# Altium footprint library 3.11-micro USB 、3.1 Type C接口.PcbLib: 31 footprints (part 1 of 2)
Each footprint in its own frame and in the unit in brackets; x right, y up, seen from the top. Pads: shape width x height; smd on the part's side, far side on the other; paste and mask are expansions set on the pad; w line width, h text height; cw(c..) or ccw(c..) is an arc to the next point about the centre after c.
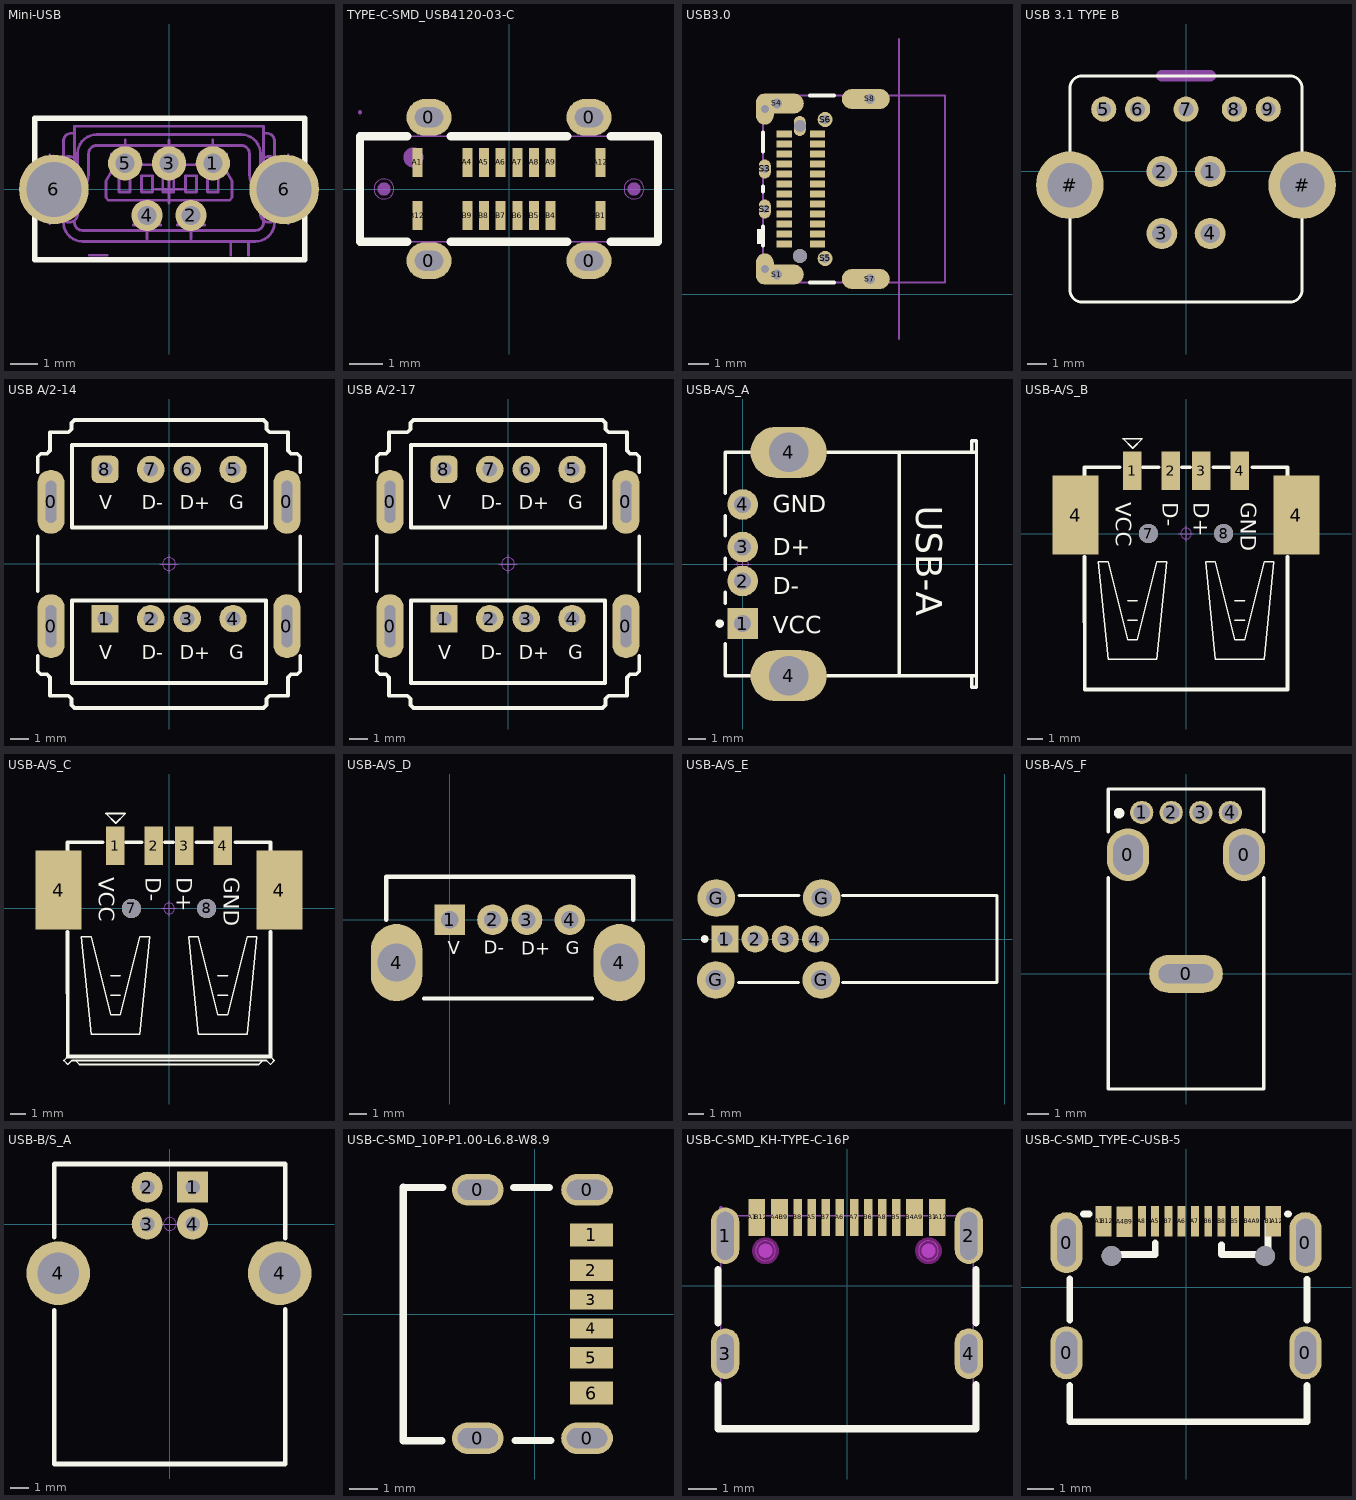
[diagram p0: the footprints below, top view; thin cyan lines are the x and y axes]

## Mini-USB [mm] "Straight, USB Serie Mini-B Type 2 Through Hole Receptacle"
height 7.7
pads (7):
  round 1.25 hole 0.7: 1(1.6,0.95) 3(0,0.95) 5(-1.6,0.95)
  round 1.143 hole 0.7: 2(0.8,-0.95) 4(-0.8,-0.95)
  round 2.54 hole 2.007: 6(-4.2,0) 6(4.2,0)
Top Overlay:
  lines w0.2: 1.4,0.5 1.8,0.5 ; -4.902,-2.565 4.953,-2.565 4.953,2.591 -3.031,2.591 -4.902,2.591 -4.902,-2.565
Mechanical 8:
  lines w0.1: -4.35,-1.25 -4.35,1.25 ; -4.15,0 -3.65,0 ; -3.65,-0.5 -3.65,0 ; -3.65,0.5 -3.65,0 ; -3.15,0 -3.65,0 ; -2.1,1.3 -1.6,1.3 ; -1.6,0.8 -1.6,1.3 ; -1.6,1.8 -1.6,1.3 ; -1.3,-1.3 -0.8,-1.3 ; -1.1,1.3 -1.6,1.3 ; -0.8,-1.8 -0.8,-1.3 ; -0.8,-0.8 -0.8,-1.3 ; -0.5,0 0,0 ; -0.5,1.3 0,1.3 ; -0.3,-1.3 -0.8,-1.3 ; 0,-0.5 0,0 ; 0,0.5 0,0 ; 0,0.8 0,1.3 ; 0,1.8 0,1.3 ; 0.3,-1.3 0.8,-1.3 ; 0.5,0 0,0 ; 0.5,1.3 0,1.3 ; 0.8,-1.8 0.8,-1.3 ; 0.8,-0.8 0.8,-1.3 ; 1.1,1.3 1.6,1.3 ; 1.3,-1.3 0.8,-1.3 ; 1.6,0.8 1.6,1.3 ; 1.6,1.8 1.6,1.3 ; 2.1,1.3 1.6,1.3 ; 3.15,0 3.65,0 ; 3.65,-0.5 3.65,0 ; 3.65,0.5 3.65,0 ; 4.15,0 3.65,0 ; 4.35,-1.25 4.35,1.25 ; -3.975,-0.875 ccw(c-3.65,-0.875) -3.325,-0.875 -3.325,0.875 ccw(c-3.65,0.875) -3.975,0.875 -3.975,-0.875 ; 3.325,-0.875 ccw(c3.65,-0.875) 3.975,-0.875 3.975,0.875 ccw(c3.65,0.875) 3.325,0.875 3.325,-0.875
Mechanical 14:
  lines w0.1: -3.45,-1.2 ccw(c-3.15,-1.2) -3.15,-1.5 3.15,-1.5 ccw(c3.15,-1.2) 3.45,-1.2 3.45,-0.403 ccw(c3.15,-0.403) 3.363,-0.192 3.138,0.035 cw(c3.635,0.528) 2.935,0.528 2.935,1.3 ccw(c2.635,1.3) 2.635,1.6 -2.635,1.6 ccw(c-2.635,1.3) -2.935,1.3 -2.935,0.528 cw(c-3.635,0.528) -3.138,0.035 -3.363,-0.192 ccw(c-3.15,-0.403) -3.45,-0.403 ; -3.45,0.288 -3.45,2.3 3.45,2.3 3.45,0.288 ; -3.45,2.05 -3.55,2.05 ccw(c-3.55,1.75) -3.85,1.75 -3.85,-0.403 ; -2.9,-2.4 -2.25,-2.4 ; 2.25,-2.4 2.25,-1.9 ; 2.9,-2.4 2.9,-1.9 ; 3.45,2.05 3.55,2.05 cw(c3.55,1.75) 3.85,1.75 3.85,-0.403 ; -3.85,-0.403 cw(c-3.15,-0.403) -3.647,0.089 -3.422,0.317 ccw(c-3.635,0.528) -3.335,0.528 -3.335,1.3 cw(c-2.635,1.3) -2.635,2 2.635,2 cw(c2.635,1.3) 3.335,1.3 3.335,0.528 ccw(c3.635,0.528) 3.422,0.317 3.647,0.089 cw(c3.15,-0.403) 3.85,-0.403 ; -3.85,-0.403 -3.85,-1.2 ccw(c-3.15,-1.2) -3.15,-1.9 3.15,-1.9 ccw(c3.15,-1.2) 3.85,-1.2 3.85,-0.403 ; 2.2,-0.4 2.3,-0.3 ; 2.2,-0.4 -2.2,-0.4 -2.3,-0.3 -2.3,0.3 -1.838,1.1 -1.318,1.1 -1.118,0.9 1.118,0.9 1.318,1.1 1.838,1.1 2.3,0.3 2.3,-0.3 ; 2.2,-0.4 2.3,-0.3 ; -1.825,-0.1 -1.825,0.5 -1.425,0.5 -1.425,-0.1 -1.825,-0.1 ; -1,-0.1 -1,0.5 -0.6,0.5 -0.6,-0.1 -1,-0.1 ; -0.225,-0.1 -0.225,0.5 0.175,0.5 0.175,-0.1 -0.225,-0.1 ; 0.6,-0.1 0.6,0.5 1,0.5 1,-0.1 0.6,-0.1 ; 1.4,-0.1 1.4,0.5 1.8,0.5 1.8,-0.1 1.4,-0.1
3D body "MOLEX_500075-1517.stp": height 7.7, standoff -2.1, extent -3.85,-2.4 3.85,2.3

## TYPE-C-SMD_USB4120-03-C [mm]
pads (20):
  oval 1.35x1.1 hole 0.6 slot 0.85 at 0 deg paste+0.051: 0(-2.4,-2.15) 0(-2.4,2.15) 0(2.4,-2.15) 0(2.4,2.15)
  rect 0.3x0.87 smd paste-100 mask+0.051: A1(-2.75,0.8) A4(-1.25,0.8) A5(-0.75,0.8) A6(-0.25,0.8) A7(0.25,0.8) A8(0.75,0.8) A9(1.25,0.8) A12(2.75,0.8) B1(2.75,-0.8) B4(1.25,-0.8) B5(0.75,-0.8) B6(0.25,-0.8) B7(-0.25,-0.8) B8(-0.75,-0.8) B9(-1.25,-0.8) B12(-2.75,-0.8)
Top Overlay:
  lines w0.254: -3.058,-1.58 -4.47,-1.58 -4.47,1.58 -3.058,1.58 ; -1.742,-1.58 1.742,-1.58 ; -1.742,1.58 1.742,1.58 ; 3.058,-1.58 4.47,-1.58 4.47,1.58 3.058,1.58
Top Paste:
  drawing of 20 lines, arcs and shapes, not listed
Mechanical 1:
  circle w0.003: c-3.75,0 r0.3
  circle w0.003: c3.75,0 r0.3
Mechanical 2:
  circle w0.2: c-3.75,0 r0.1
  circle w0.2: c3.75,0 r0.1
  circle w0.3: c-2.87,0.95 r0.15
Mechanical 6:
  lines w0.051: -4.47,-1.58 -4.47,1.58 4.47,1.58 4.47,-1.58 -4.47,-1.58
Mechanical 7:
  region: -2.65,2.3 -2.15,2.3 -2.15,1.57 -2.65,1.57
  region: -2.15,-2.3 -2.65,-2.3 -2.65,-1.57 -2.15,-1.57
  region: 2.65,-2.3 2.15,-2.3 2.15,-1.57 2.65,-1.57
  region: 2.15,2.3 2.65,2.3 2.65,1.57 2.15,1.57
Mechanical 8:
  region: -4.41,2.3 -4.41,2.275 -4.445,2.24 -4.495,2.24 -4.53,2.275 -4.53,2.3 -4.53,2.325 -4.495,2.36 -4.445,2.36 -4.41,2.325 -4.41,2.3
Mechanical 9:
  region: -2.85,1.1 -2.65,1.1 -2.65,0.5 -2.85,0.5
  region: 2.65,-0.5 2.85,-0.5 2.85,-1.1 2.65,-1.1
  region: -1.35,1.1 -1.15,1.1 -1.15,0.5 -1.35,0.5
  region: -0.85,1.1 -0.65,1.1 -0.65,0.5 -0.85,0.5
  region: -0.35,1.1 -0.15,1.1 -0.15,0.5 -0.35,0.5
  region: 0.15,1.1 0.35,1.1 0.35,0.5 0.15,0.5
  region: 0.65,1.1 0.85,1.1 0.85,0.5 0.65,0.5
  region: 1.15,1.1 1.35,1.1 1.35,0.5 1.15,0.5
  region: 2.65,1.1 2.85,1.1 2.85,0.5 2.65,0.5
  region: 1.15,-0.5 1.35,-0.5 1.35,-1.1 1.15,-1.1
  region: 0.65,-0.5 0.85,-0.5 0.85,-1.1 0.65,-1.1
  region: 0.15,-0.5 0.35,-0.5 0.35,-1.1 0.15,-1.1
  region: -0.35,-0.5 -0.15,-0.5 -0.15,-1.1 -0.35,-1.1
  region: -0.85,-0.5 -0.65,-0.5 -0.65,-1.1 -0.85,-1.1
  region: -1.35,-0.5 -1.15,-0.5 -1.15,-1.1 -1.35,-1.1
  region: -2.85,-0.5 -2.65,-0.5 -2.65,-1.1 -2.85,-1.1
  region: -2.65,2 -2.65,2.3 -2.15,2.3 -2.15,2
  region: 2.15,2 2.15,2.3 2.65,2.3 2.65,2
  region: 2.15,-2.3 2.15,-2 2.65,-2 2.65,-2.3
  region: -2.65,-2.3 -2.65,-2 -2.15,-2 -2.15,-2.3
3D body "U5~TYPE-C-SMD_USB4120-03-C~TYPE-C-SMD_USB4120-03-C~OULM.STEP": height 6.45, standoff -1, extent -4.343,-2.427 4.597,2.173

## USB3.0 [mm]
pads (42):
  rect 0.77x0.35 smd: A1(26.498,2.508) A2(26.498,3.008) A3(26.498,3.508) A4(26.498,4.008) A5(26.498,4.508) A6(26.498,5.008) A7(26.498,5.508) A8(26.498,6.008) A9(26.498,6.508) A10(26.498,7.008) A11(26.498,7.508) A12(26.498,8.008) B1(28.168,8.008) B2(28.168,7.508) B3(28.168,7.008) B4(28.168,6.508) B5(28.168,6.008) B6(28.168,5.508) B7(28.168,5.008) B8(28.168,4.508) B9(28.168,4.008) B10(28.168,3.508) B11(28.168,3.008) B12(28.168,2.508)
  round 0.7 hole 0.7 unplated mask+0: ALIGN1(27.283,1.908)
  oval 0.6x1 hole 0.6 unplated mask+0: ALIGN2(27.283,8.408)
  oval 1.6x0.5 hole 0.5 mask+0: S1(26.133,0.983) S4(26.133,9.533)
  oval 0.6x0.95 hole 0.4: S2(25.533,4.258) S3(25.533,6.258)
  round 0.75 hole 0.45: S5(28.553,1.783) S6(28.553,8.733)
  oval 1.5x0.5 hole 0.5 mask+0: S7(30.783,0.758) S8(30.783,9.758)
  oval 0.9x1.555 all layers, no hole: ""(25.533,1.26) ""(25.533,9.255)
  oval 0.4x1.055 hole 0.4 mask+0: ""(25.533,1.26) ""(25.533,9.255)
  oval 2.4x1 all layers, no hole: ""(26.283,0.983) ""(26.283,9.533) ""(30.583,0.758) ""(30.583,9.758)
Top Overlay:
  region: 25.433,2.508 25.433,3.258 25.133,3.258 25.133,2.508
  lines w0.2: 25.433,2.438 25.433,3.388 ; 25.433,5.128 25.433,5.388 ; 25.433,7.128 25.433,8.078 ; 27.79,0.583 29.003,0.583 ; 27.79,9.933 29.003,9.933
Mechanical 1:
  lines w0.1: 32.233,-2.242 32.233,12.758
Mechanical 5:
  lines w0.1: 25.433,0.583 25.433,9.933 34.533,9.933 34.533,0.583 25.433,0.583

## USB 3.1 TYPE B [mm] "USB 3.1  TYPE B"
height 16.2
pads (11):
  round 1.6 hole 1: 1(1.25,-0.01) 2(-1.25,-0.01) 3(-1.25,-3.21) 4(1.25,-3.21)
  round 1.3 hole 0.762: 5(-4.25,3.21) 6(-2.5,3.21) 7(0,3.21) 8(2.5,3.21) 9(4.25,3.21)
  round 3.5 hole 2.3: #(-6,-0.71) #(6,-0.71)
Top Overlay:
  lines w0.15: -6,-6.12 ccw(c-5.365,-6.12) -5.365,-6.755 5.365,-6.755 ccw(c5.365,-6.12) 6,-6.12 6,-0.71 6,4.294 ccw(c5.365,4.294) 5.365,4.929 -5.365,4.929 ccw(c-5.365,4.294) -6,4.294 -6,-0.71 -6,-6.12
Mechanical 1:
  lines w0.6: -1.25,4.929 1.25,4.929
3D body "gsb422x7eu.stp": height 16.2, standoff -3.25, extent -6.973,-7.189 6.973,5.411

## USB A/2-14 [mm] "双层USB母座高14.2mm"
pads (12):
  oval 1.5x3.5 hole 0.6 slot 2.3 at 90 deg: 0(-6.45,-3.4) 0(-6.45,3.4) 0(6.45,-3.4) 0(6.45,3.4)
  rect 1.5x1.5 hole 0.8: 1(-3.5,-2.985)
  round 1.5 hole 0.8: 2(-1,-2.985) 3(1,-2.985) 4(3.5,-2.985) 5(3.5,5.17) 6(1,5.17) 7(-1,5.17)
  rrect50% 1.5x1.5 hole 0.8: 8(-3.5,5.17)
Top Overlay:
  lines w0.203: -7.176,-5.024 -7.176,-5.863 -7.007,-6.031 -6.67,-6.031 -6.501,-6.2 -6.5,-6.199 -6.5,-7.199 -5.5,-7.199 -5.331,-7.369 -5.331,-7.706 -5.163,-7.875 5.162,-7.875 5.331,-7.706 5.331,-7.369 5.5,-7.2 6.5,-7.199 6.5,-6.199 6.501,-6.2 6.67,-6.031 7.007,-6.031 7.176,-5.863 7.176,-5.024 ; -7.176,-1.476 -7.176,1.524 ; -7.176,5.024 -7.176,5.862 -7.007,6.031 -6.67,6.031 -6.501,6.2 -6.5,6.199 -6.5,7.199 -5.5,7.199 ; -5.5,7.2 -5.331,7.369 -5.331,7.706 -5.163,7.875 5.162,7.875 5.331,7.706 5.331,7.369 5.5,7.2 6.5,7.199 6.5,6.199 6.501,6.2 6.67,6.031 7.007,6.031 7.176,5.863 7.176,5.024 ; 7.176,-1.476 7.176,1.524 ; -5.3,-6.5 -5.3,-2 5.3,-2 5.3,-6.5 -5.3,-6.5 ; -5.3,2 5.3,2 5.3,6.5 -5.3,6.5 -5.3,2
  text "V" at -3.812,2.993 h0.76
  text "G" at 3.3,3 h0.76
  text "D+" at 0.6,3 h0.76
  text "D-" at -1.5,3 h0.76
  text "D-" at -1.5,-5.2 h0.76
  text "D+" at 0.6,-5.2 h0.76
  text "G" at 3.3,-5.2 h0.76
  text "V" at -3.812,-5.207 h0.76
Mechanical 15:
  circle w0.05: c0,0 r0.35
  lines w0.05: -0.5,0 0.5,0 ; 0,-0.5 0,0.5
3D body "USB A型14-2-14_2-180.STEP": height 14.26, standoff -4.03, extent -7.927,-7.8 7.927,7.8

## USB A/2-17 [mm] "双层USB母座高16.7mm"
pads (12):
  oval 1.5x3.5 hole 0.6 slot 2.3 at 90 deg: 0(-6.45,-3.4) 0(-6.45,3.4) 0(6.45,-3.4) 0(6.45,3.4)
  rect 1.5x1.5 hole 0.8: 1(-3.5,-2.985)
  round 1.5 hole 0.8: 2(-1,-2.985) 3(1,-2.985) 4(3.5,-2.985) 5(3.5,5.17) 6(1,5.17) 7(-1,5.17)
  rrect50% 1.5x1.5 hole 0.8: 8(-3.5,5.17)
Top Overlay:
  lines w0.203: -7.176,-5.024 -7.176,-5.863 -7.007,-6.031 -6.67,-6.031 -6.501,-6.2 -6.5,-6.199 -6.5,-7.199 -5.5,-7.199 -5.331,-7.369 -5.331,-7.706 -5.163,-7.875 5.162,-7.875 5.331,-7.706 5.331,-7.369 5.5,-7.2 6.5,-7.199 6.5,-6.199 6.501,-6.2 6.67,-6.031 7.007,-6.031 7.176,-5.863 7.176,-5.024 ; -7.176,-1.476 -7.176,1.524 ; -7.176,5.024 -7.176,5.862 -7.007,6.031 -6.67,6.031 -6.501,6.2 -6.5,6.199 -6.5,7.199 -5.5,7.199 ; -5.5,7.2 -5.331,7.369 -5.331,7.706 -5.163,7.875 5.162,7.875 5.331,7.706 5.331,7.369 5.5,7.2 6.5,7.199 6.5,6.199 6.501,6.2 6.67,6.031 7.007,6.031 7.176,5.863 7.176,5.024 ; 7.176,-1.476 7.176,1.524 ; -5.3,-6.5 5.3,-6.5 5.3,-2 -5.3,-2 -5.3,-6.5 ; -5.3,2 -5.3,6.5 5.3,6.5 5.3,2 -5.3,2
  text "V" at -3.812,-5.207 h0.76
  text "G" at 3.3,-5.2 h0.76
  text "D+" at 0.6,-5.2 h0.76
  text "D-" at -1.5,-5.2 h0.76
  text "D-" at -1.5,3 h0.76
  text "D+" at 0.6,3 h0.76
  text "G" at 3.3,3 h0.76
  text "V" at -3.812,2.993 h0.76
Mechanical 15:
  circle w0.05: c0,0 r0.35
  lines w0.05: -0.5,0 0.5,0 ; 0,-0.5 0,0.5
3D body "USB A型14-2-16_7-180.STEP": height 16.75, standoff -4.03, extent -7.927,-7.8 7.927,7.8

## USB-A/S_A [mm] "A型直插母头，"
height 7.01
pads (6):
  rect 1.8x1.8 hole 1: 1(0,-3.5)
  round 1.8 hole 1: 2(0,-1) 3(0,1) 4(0,3.5)
  oval 4.5x3 hole 2.3: 4(2.71,-6.57) 4(2.71,6.57)
Top Overlay:
  circle w0.25: c-1.35,-3.5 r0.125
  lines w0.2: -1.01,-4.7 -1.01,-6.565 0.41,-6.565 ; -1.01,-2.3 -1.01,-1.66 ; -1.01,-0.34 -1.01,0.34 ; -1.01,1.66 -1.01,2.84 ; -1.01,4.16 -1.01,6.565 0.41,6.565 ; 5.01,-6.565 13.752,-6.565 ; 5.01,6.565 13.752,6.565 ; 13.462,-6.565 13.462,-7.25 13.752,-7.25 13.752,7.25 13.462,7.25 13.462,6.565
  lines w0.203: 9.21,-6.565 9.21,6.565
  text "USB-A" at 10.21,3.43 h1.52
  text "VCC" at 1.778,-4.064 h1.02
  text "D-" at 1.778,-1.778 h1.02
  text "D+" at 1.778,0.508 h1.02
  text "GND" at 1.778,3.048 h1.02
Mechanical 15:
  circle w0.05: c0,0 r0.35
  lines w0.05: -0.5,0 0.5,0 ; 0,-0.5 0,0.5
3D body "USB A型 ?": height 6.8, standoff -4.31, extent -0.605,-7.342 13.7,7.342

## USB-A/S_B [mm] "A型贴片母头，"
pads (8):
  rect 1.2x2.5 smd: 1(-3.5,4.1) 2(-1,4.1) 3(1,4.1) 4(3.5,4.1)
  rect 3x5.15 smd: 4(-7.2,1.2) 4(7.2,1.2)
  round 1.25 hole 1.25 unplated: 7(-2.45,0) 8(2.45,0)
Top Overlay:
  lines w0.1: -3.803,-5.649 -3.168,-5.649 ; -3.803,-4.379 -3.168,-4.379 ; 3.182,-5.649 3.817,-5.649 ; 3.182,-4.379 3.817,-4.379 ; -5.708,-1.839 -5.073,-8.189 -1.898,-8.189 -1.263,-1.839 -1.898,-1.839 -3.168,-6.919 -3.803,-6.919 -5.073,-1.839 -5.708,-1.839 ; -4.113,6.19 -3.478,5.555 -2.843,6.19 -4.113,6.19 ; 1.277,-1.839 1.912,-8.189 5.087,-8.189 5.722,-1.839 5.087,-1.839 3.817,-6.919 3.182,-6.919 1.912,-1.839 1.277,-1.839
  lines w0.254: -6.604,-1.524 -6.597,-10.16 6.611,-10.16 6.604,-1.524 ; -6.604,3.81 -6.604,4.318 -4.318,4.318 ; -2.794,4.318 -1.778,4.318 ; -0.254,4.318 0.254,4.318 ; 1.778,4.318 2.794,4.318 ; 4.318,4.318 6.611,4.318 6.604,3.81
  text "GND" at 3.556,2.032 h1.02
  text "D+" at 0.508,2.032 h1.02
  text "D-" at -1.524,2.032 h1.02
  text "VCC" at -4.572,2.032 h1.02
Mechanical 15:
  circle w0.05: c0,0 r0.35
  lines w0.05: -0.5,0 0.5,0 ; 0,-0.5 0,0.5
3D body "USB A型 ?": height 6.9, standoff -0.55, extent -7.75,-9.9 7.75,4.8

## USB-A/S_C [mm] "A型贴片母头，"
pads (8):
  rect 1.2x2.5 smd: 1(-3.5,4.1) 2(-1,4.1) 3(1,4.1) 4(3.5,4.1)
  rect 3x5.15 smd: 4(-7.2,1.2) 4(7.2,1.2)
  round 1.25 hole 1.25 unplated: 7(-2.45,0) 8(2.45,0)
Top Overlay:
  lines w0.1: -6.597,-9.652 -6.851,-9.906 -6.597,-10.16 -6.343,-9.906 -6.089,-9.906 ; -3.803,-5.649 -3.168,-5.649 ; -3.803,-4.379 -3.168,-4.379 ; 3.182,-5.649 3.817,-5.649 ; 3.182,-4.379 3.817,-4.379 ; 6.611,-9.652 6.865,-9.906 6.611,-10.16 6.357,-9.906 6.103,-9.906 ; -6.089,-9.906 6.103,-9.906 ; -6.089,-9.906 -5.835,-10.166 5.849,-10.166 6.103,-9.906 ; -5.708,-1.839 -5.073,-1.839 -3.803,-6.919 -3.168,-6.919 -1.898,-1.839 -1.263,-1.839 -1.898,-8.189 -5.073,-8.189 -5.708,-1.839 ; -4.113,6.19 -2.843,6.19 -3.478,5.555 -4.113,6.19 ; 1.277,-1.839 1.912,-1.839 3.182,-6.919 3.817,-6.919 5.087,-1.839 5.722,-1.839 5.087,-8.189 1.912,-8.189 1.277,-1.839
  lines w0.254: -6.604,-1.524 -6.597,-9.652 ; -6.604,3.81 -6.604,4.318 -4.318,4.318 ; -6.597,-9.652 6.611,-9.652 ; -2.794,4.318 -1.778,4.318 ; -0.254,4.318 0.254,4.318 ; 1.778,4.318 2.794,4.318 ; 4.318,4.318 6.611,4.318 6.604,3.81 ; 6.604,-1.524 6.611,-9.652
  text "VCC" at -4.572,2.032 h1.02
  text "D-" at -1.524,2.032 h1.02
  text "D+" at 0.508,2.032 h1.02
  text "GND" at 3.556,2.032 h1.02
Mechanical 15:
  circle w0.05: c0,0 r0.35
  lines w0.05: -0.5,0 0.5,0 ; 0,-0.5 0,0.5
3D body "USB A型 ?": height 7.4, standoff -0.55, extent -7.75,-9.9 7.75,4.8

## USB-A/S_D [mm] "A型直插母头，"
pads (6):
  rect 1.8x1.8 hole 1: 1(0,0)
  round 1.8 hole 1: 2(2.5,0) 3(4.5,0) 4(7,0)
  oval 3x4.5 hole 2.2: 4(-3.1,-2.5) 4(9.9,-2.5)
Top Overlay:
  lines w0.254: -3.7,0 -3.7,2.5 10.7,2.5 10.7,0 ; -1.5,-4.6 8.3,-4.6
  text "D-" at 1.996,-1.981 h0.76
  text "D+" at 4.181,-2.032 h0.76
  text "G" at 6.771,-2.007 h0.76
  text "V" at -0.112,-2.007 h0.76
Mechanical 1:
  lines w0.254: -0.2,-0.2 cw(c0,-0.2) 0,0
3D body "USB-H.stp": height 14, standoff -4, extent -3.705,-4.599 10.695,2.501

## USB-A/S_E [mm] "A型直插母头，"
pads (8):
  rect 1.8x1.8 hole 1: 1(-18.56,0)
  round 1.8 hole 1: 2(-16.56,0) 3(-14.56,0) 4(-12.56,0)
  round 2.5 hole 1.35: G(-19.167,-2.718) G(-19.141,2.718) G(-12.167,-2.718) G(-12.141,2.718)
Top Overlay:
  circle w0.25: c-19.91,0 r0.125
  lines w0.2: -17.65,-2.878 -13.684,-2.878 ; -17.624,2.878 -13.658,2.878 ; -10.773,-2.88 -0.508,-2.88 -0.508,2.88 -10.773,2.88
3D body "USB-4H4.stp": height 14.45, standoff -3.69, extent -19.725,-3.606 -0.475,3.644

## USB-A/S_F [mm] "A型侧插短体无卷边 90度母座"
pads (7):
  oval 2x2.5 hole 1.4 slot 1.9 at 90 deg: 0(-2.75,5.65) 0(2.75,5.65)
  oval 3.5x1.8 hole 0.9 slot 2.6 at 0 deg: 0(0,0)
  round 1.1 hole 0.8: 1(-2.1,7.65) 2(-0.7,7.65) 3(0.7,7.65) 4(2.1,7.65)
Top Overlay:
  circle w0.25: c-3.173,7.62 r0.125
  lines w0.152: -3.683,4.572 -3.683,-5.461 3.683,-5.461 3.683,4.572 ; -3.683,6.731 -3.683,8.763 3.683,8.763 3.683,6.731
3D body "USB A型?": height 13.7, standoff -3.05, extent -3.56,-5.35 3.56,8.65

## USB-B/S_A [mm] "b型USB 母座 16.3*13.7*11mm"
height 1.1
pads (6):
  rect 1.7x1.7 hole 0.8: 1(1.25,2.032)
  round 1.7 hole 0.8: 2(-1.25,2.032) 3(-1.25,0) 4(1.25,0)
  round 3.5 hole 2.3: 4(-6.141,-2.71) 4(6.051,-2.71)
Top Overlay:
  lines w0.254: -6.35,-4.737 -6.35,-13.208 6.35,-13.208 6.35,-4.686 ; -6.35,-0.724 -6.35,3.302 6.35,3.302 6.35,-0.775
Mechanical 15:
  circle w0.05: c0,0 r0.35
  lines w0.05: -0.5,0 0.5,0 ; 0,-0.5 0,0.5
3D body "USB B型 ?": height 11.45, standoff -2.95, extent -6.86,-13.16 6.859,3.14

## USB-C-SMD_10P-P1.00-L6.8-W8.9 [mil]
pads (10):
  oval 70.82x43.31 hole 27.56 slot 55.16 at 0 deg: 0(-77.75,-170.08) 0(-77.75,170.08) 0(71.84,-170.08) 0(71.84,170.08)
  rect 59x31.5 smd: 1(77.76,108.25) 6(77.76,-108.25)
  rect 59x29.9 smd: 2(77.76,59.85) 5(77.76,-59.85)
  rect 59x27.6 smd: 3(77.76,19.7) 4(77.76,-19.7)
Top Overlay:
  lines w10: -180.15,-173.6 -126.94,-173.6 ; -180.12,-173.62 -180.12,173.62 ; -180.12,173.23 -125.79,173.23 ; -28.54,173.23 20.27,173.23 ; -26.65,-173.23 22.16,-173.23
3D body "USB Type-C_B.STEP": height 126.77, standoff -37.01, extent -182.36,-170.99 85.35,180.98

## USB-C-SMD_KH-TYPE-C-16P [mm]
pads (20):
  oval 1x2 hole 0.6 slot 1.7 at 90 deg: 1(-4.32,1.765) 2(4.32,1.765)
  oval 1x1.8 hole 0.6 slot 1.4 at 90 deg: 3(-4.32,-2.415) 4(4.32,-2.415)
  rect 0.3x1.3 smd paste-100 mask+0.05: A1(-3.35,2.415) A4(-2.55,2.415) A5(-1.25,2.415) A6(-0.25,2.415) A7(0.25,2.415) A8(1.25,2.415) A9(2.55,2.415) A12(3.35,2.415) B1(3.05,2.415) B4(2.25,2.415) B5(1.75,2.415) B6(0.75,2.415) B7(-0.75,2.415) B8(-1.75,2.415) B9(-2.25,2.415) B12(-3.05,2.415)
Top Overlay:
  lines w0.254: -4.572,-3.507 -4.572,-5.08 4.572,-5.08 4.572,-3.507 ; -4.572,-1.323 -4.572,0.573 ; 4.572,-1.323 4.572,0.573
Top Paste:
  drawing of 16 lines, arcs and shapes, not listed
Keep-Out Layer:
  board cut-out: -2.54,1.235 -2.54,1.305 -2.593,1.433 -2.692,1.532 -2.82,1.585 -2.96,1.585 -3.088,1.532 -3.187,1.433 -3.24,1.304 -3.24,1.235 -3.24,1.165 -3.187,1.037 -3.088,0.938 -2.96,0.885 -2.82,0.885 -2.692,0.938 -2.593,1.037 -2.54,1.165 -2.54,1.235
  board cut-out: 3.24,1.235 3.24,1.305 3.187,1.433 3.088,1.532 2.96,1.585 2.82,1.585 2.692,1.532 2.593,1.433 2.54,1.304 2.54,1.235 2.54,1.165 2.593,1.037 2.692,0.938 2.82,0.885 2.96,0.885 3.088,0.938 3.187,1.037 3.24,1.165 3.24,1.235
Keep-Out Layer:
  circle w0.005: c-2.89,1.235 r0.35
  circle w0.254: c-2.89,1.235 r0.35
  circle w0.005: c2.89,1.235 r0.35
  circle w0.254: c2.89,1.235 r0.35
Mechanical 1:
  circle w0.005: c-2.89,1.235 r0.35
  circle w0.005: c2.89,1.235 r0.35
Mechanical 6:
  circle w0.25: c-2.89,1.235 r0.125
  circle w0.25: c2.89,1.235 r0.125
Mechanical 15:
  region: -4.41,2.76 -4.41,2.785 -4.445,2.82 -4.495,2.82 -4.53,2.784 -4.53,2.76 -4.53,2.735 -4.495,2.7 -4.445,2.7 -4.41,2.735 -4.41,2.76
  region: -4.47,2.315 -4.17,2.315 -4.17,1.215 -4.47,1.215
  region: 4.17,2.315 4.47,2.315 4.47,1.215 4.17,1.215
  region: -4.47,-2.015 -4.17,-2.015 -4.17,-2.815 -4.47,-2.815
  region: 4.17,-2.015 4.47,-2.015 4.47,-2.815 4.17,-2.815
  region: 1.15,2.76 1.35,2.76 1.35,1.76 1.15,1.76
  region: 1.65,2.76 1.85,2.76 1.85,1.76 1.65,1.76
  region: 0.65,2.76 0.85,2.76 0.85,1.76 0.65,1.76
  region: 0.15,2.76 0.35,2.76 0.35,1.76 0.15,1.76
  region: -0.35,2.76 -0.15,2.76 -0.15,1.76 -0.35,1.76
  region: -0.85,2.76 -0.65,2.76 -0.65,1.76 -0.85,1.76
  region: -1.35,2.76 -1.15,2.76 -1.15,1.76 -1.35,1.76
  region: -1.85,2.76 -1.65,2.76 -1.65,1.76 -1.85,1.76
  region: 3,2.76 3.2,2.76 3.2,1.76 3,1.76
  region: 3.2,2.76 3.4,2.76 3.4,1.76 3.2,1.76
  region: 2.2,2.76 2.4,2.76 2.4,1.76 2.2,1.76
  region: 2.4,2.76 2.6,2.76 2.6,1.76 2.4,1.76
  region: -2.6,2.76 -2.4,2.76 -2.4,1.76 -2.6,1.76
  region: -2.4,2.76 -2.2,2.76 -2.2,1.76 -2.4,1.76
  region: -3.4,2.76 -3.2,2.76 -3.2,1.76 -3.4,1.76
  region: -3.2,2.76 -3,2.76 -3,1.76 -3.2,1.76
  lines w0.051: -4.47,-5.08 -4.47,2.47 4.47,2.47 4.47,-5.08 -4.47,-5.08
3D body "usb.STEP": height 3.17, standoff -1.18, extent -4.47,-5.143 4.47,2.667

## USB-C-SMD_TYPE-C-USB-5 [mm]
pads (22):
  oval 1.2x2 hole 0.8 slot 1.6 at 90 deg: 0(-4.5,-2.475) 0(4.5,-2.475)
  oval 1.2x2.3 hole 0.7 slot 1.8 at 90 deg: 0(-4.5,1.675) 0(4.5,1.675)
  rect 0.3x1.15 smd: A1(-3.263,2.473) A4(-2.462,2.471) A5(-1.162,2.475) A6(-0.162,2.475) A7(0.337,2.473) A9(2.638,2.475) A12(3.438,2.475) B1(3.138,2.475) B4(2.337,2.475) B5(1.838,2.475) B6(0.838,2.475) B7(-0.663,2.473) B9(-2.162,2.471) B12(-2.963,2.473)
  rect 0.3x1.148 smd: A8(-1.663,2.475) B8(1.337,2.475)
  round 0.75 hole 0.75 unplated: ""(-2.803,1.175) ""(2.978,1.175)
Top Overlay:
  lines w0.254: -4.382,-3.698 -4.382,-5.075 4.557,-5.075 4.557,-3.704 ; -4.382,-1.252 -4.382,0.302 ; -3.856,2.75 -3.644,2.75 ; -2.912,1.225 -1.162,1.225 -1.162,1.669 ; 1.335,1.599 1.335,1.228 3.085,1.228 3.085,2.478 ; 3.819,2.75 3.856,2.75 ; 4.557,-1.246 4.557,0.296
3D body "USB Type-C_A.STEP": height 3.25, standoff -0.85, extent -4.343,-5.14 4.597,2.76